# EAGLE library part ARJM11C7-009-AB-EW2 (library ARJM11C7-009-AB-EW2)
Conn RJ-45 F 8 POS 1.27mm Solder RA Thru-Hole 12 Terminal 1 Port Tray Source: Datasheet <https://datasheet.datasheetarchive.com/originals/dk/DKDS41/DSANUWW0031023.pdf>
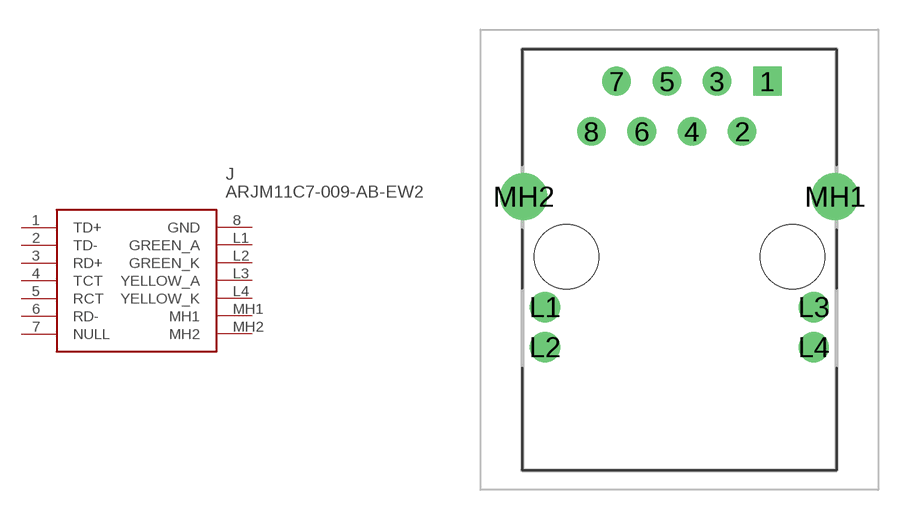
[diagram p0: symbol with the pads of ARJM11C7009ABEW2; footprint ARJM11C7009ABEW2]

Designator prefix J

## ARJM11C7-009-AB-EW2 (Description: Conn RJ-45 F 8 POS 1.27mm Solder RA Thru-Hole 12 Terminal 1 Port Tray; Height: 15.3mm; Manufacturer_Name: ABRACON; Manufacturer_Part_Number: ARJM11C7-009-AB-EW2; Mouser_Part_Number: 815-RJM11C7009ABEW2; Mouser_Price-Stock: https://www.mouser.co.uk/ProductDetail/ABRACON/ARJM11C7-009-AB-EW2?qs=YCa%2FAAYMW016No73G%2F4GTg%3D%3D)  [ARJM11C7009ABEW2]
1  TD+
2  TD-
3  RD+
4  TCT
5  RCT
6  RD-
7  NULL
8  GND
L1  GREEN_A
L2  GREEN_K
L3  YELLOW_A
L4  YELLOW_K
MH1  MH1
MH2  MH2

## Footprint ARJM11C7009ABEW2 (pad centres in mm)
ARJM11C7-009-AB-EW2-3
drill 0.89 pad 1.446 square: 1 0,0
drill 0.89 pad 1.446: 2 -1.27,-2.54; 3 -2.54,0; 4 -3.81,-2.54; 5 -5.08,0; 6 -6.35,-2.54; 7 -7.62,0; 8 -8.89,-2.54
drill 1.02 pad 1.53: L1 -11.245,-11.44; L2 -11.245,-13.47; L3 2.355,-11.44; L4 2.355,-13.47
drill 1.57 pad 2.355: MH1 3.43,-5.84; MH2 -12.32,-5.84
hole 3.25 at 1.27,-8.89
hole 3.25 at -10.16,-8.89